# Altium footprint library Footprint.PcbLib: 154 footprints (part 3 of 10)
Each footprint in its own frame and in the unit in brackets; x right, y up, seen from the top. Pads: shape width x height; smd on the part's side, far side on the other; paste and mask are expansions set on the pad; w line width, h text height; cw(c..) or ccw(c..) is an arc to the next point about the centre after c.
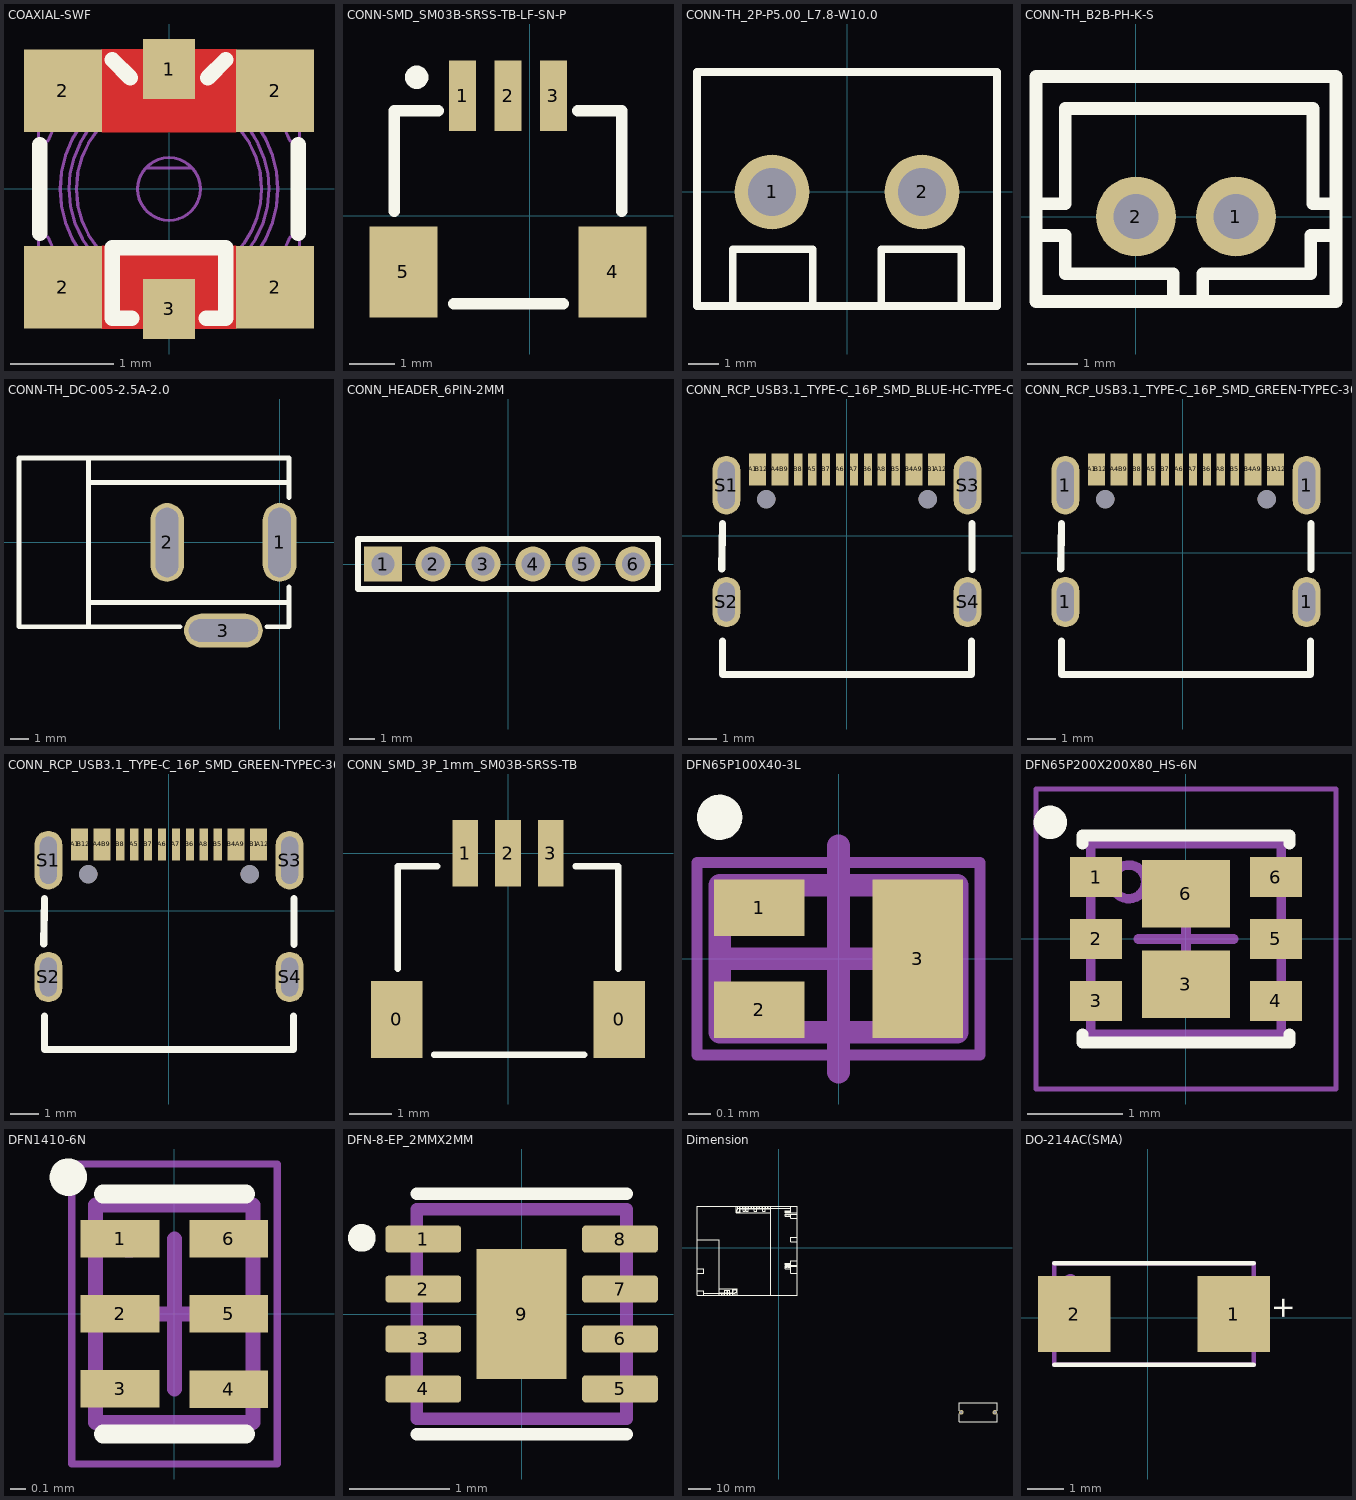
[diagram p2: the footprints below, top view; thin cyan lines are the x and y axes]

## COAXIAL-SWF [mm]
pads (6):
  rect 0.5x0.58 smd: 1(0,1.16) 3(0,-1.16)
  rect 0.75x0.8 smd: 2(-1.025,-0.95) 2(-1.025,0.95) 2(1.025,-0.95) 2(1.025,0.95)
Top Layer:
  pour cut-out: 0.65,-0.55 -0.65,-0.55 -0.65,-1.35 0.65,-1.35
  pour cut-out: -0.65,0.55 0.65,0.55 0.65,1.35 -0.65,1.35
Top Overlay:
  lines w0.15: -1.25,-0.43 -1.25,0.43 ; -0.55,1.25 -0.375,1.075 ; -0.36,-1.25 -0.55,-1.25 -0.55,-0.57 0.55,-0.57 0.55,-1.25 0.36,-1.25 ; 0.375,1.075 0.55,1.25 ; 1.25,-0.43 1.25,0.43
Mechanical 7:
  drawing of 206 lines, arcs and shapes, not listed
  text ".Designator" at -0.785,-0.7 h0.38
3D body: height 0.6, standoff 0.55, extent -1.262,-1.248 1.262,1.251
3D body: height 0.15, standoff 0, extent -0.227,0.899 0.227,1.299
3D body: height 0.15, standoff 0, extent -0.227,-1.301 0.227,-0.758
3D body: height 1.55, standoff 1.25, extent -1.05,-1.05 1.05,1.05
3D body: height 1.25, standoff 0.95, extent -1.05,-1.049 1.05,1.05
3D body: height 0.9, standoff 0.6, extent -1.05,-1.049 1.05,1.05
3D body: height 0.55, standoff 0.1, extent -1.262,-1.252 1.262,1.253
3D body: height 0.6, standoff 0, extent -1.262,0.655 -0.757,1.248
3D body: height 0.6, standoff 0, extent -1.262,-1.25 -0.757,-0.649
3D body: height 0.6, standoff 0, extent 0.757,-1.246 1.262,-0.653
3D body: height 0.6, standoff 0, extent 0.757,0.655 1.262,1.249
3D body: height 0.95, standoff 0.75, extent -1,-0.999 1,1.001
3D body: height 0.75, standoff 0.6, extent -1.05,-1.049 1.05,1.05
3D body: height 1.4, standoff 0.6, extent -0.9,-0.9 0.9,0.901

## CONN-SMD_SM03B-SRSS-TB-LF-SN-P [mm]
pads (5):
  rect 0.6x1.55 smd paste+0 mask+0.051: 1(-1.481,2.64) 2(-0.48,2.64) 3(0.52,2.64)
  rect 1.5x2 smd paste+0 mask+0.051: 4(1.82,-1.235) 5(-2.781,-1.235)
Top Overlay:
  circle w0.254: c-2.489,3.048 r0.13
  lines w0.254: -2.981,0.102 -2.981,2.315 ; -2.85,2.315 -2.981,2.315 ; -2.012,2.315 -2.981,2.315 ; -1.676,-1.93 0.737,-1.93 ; 1.051,2.315 2.019,2.315 2.019,0.102
3D body "SM03B-SRSS-TB(LF)(SN)--3DModel-STEP-56544.STEP": height 2.96, standoff 0, extent -2.906,-2.032 2.094,2.918

## CONN-TH_2P-P5.00_L7.8-W10.0 [mm]
pads (2):
  round 2.5 hole 1.6 paste-2539.97 mask+0.051: 1(-2.5,0) 2(2.5,0)
Top Overlay:
  lines w0.254: -3.81,-3.683 -3.81,-1.905 -1.143,-1.905 -1.143,-3.683 ; 1.143,-3.683 1.143,-1.905 3.81,-1.905 3.81,-3.683 ; -5,-3.8 5,-3.8 5,4 -5,4 -5,-3.8
3D body "User Library-WJ127-5_0-2P.step": height 10.3, standoff -2.8, extent -5,-3.96 5,4.14

## CONN-TH_B2B-PH-K-S [mm]
pads (2):
  round 1.6 hole 0.9 paste-2539.97 mask+0.051: 1(2,0) 2(0,0)
Top Overlay:
  lines w0.254: -1.921,-0.381 -1.413,-0.381 -1.413,-1.143 0.746,-1.143 0.746,-1.651 ; -1.921,0.254 -1.413,0.254 -1.413,2.159 3.54,2.159 3.54,0.254 3.921,0.254 ; 1.333,-1.651 1.333,-1.143 3.492,-1.143 3.492,-0.381 4,-0.381 ; -2,-1.7 -2,2.8 4,2.8 4,-1.7 -2,-1.7
3D body "B2B-PH-K-S(LF)(SN)--3DModel-STEP-56544.STEP": height 6, standoff -3.4, extent -1.959,-1.564 3.941,2.936

## CONN-TH_DC-005-2.5A-2.0 [mm]
pads (3):
  oval 1.8x4.2 hole 1.2 slot 3.7 at 90 deg paste-2539.97 mask+0.051: 1(0,0) 2(-5.999,0)
  oval 4.2x1.8 hole 1.2 slot 3.7 at 0 deg paste-2539.97 mask+0.051: 3(-3,-4.7)
Top Overlay:
  lines w0.254: -10.199,-4.5 -10.199,4.5 ; -10.119,-3.2 0.501,-3.2 ; -10.119,3.2 0.501,3.2 ; -5.313,-4.5 -13.9,-4.5 -13.9,4.5 0.501,4.5 0.501,2.388 ; -0.687,-4.5 0.501,-4.5 0.501,-2.362
3D body "dc-005-5a-2_0.stp": height 11, standoff -3.6, extent -13.848,-4.878 0.152,4.522

## CONN_HEADER_6PIN-2MM [mm]
pads (6):
  rect 1.524x1.4 hole 0.9 paste-2539.97 mask+0.051: 1(-5,0)
  round 1.4 hole 0.9 paste-2539.97 mask+0.051: 2(-3,0) 3(-1,0) 4(1,0) 5(3,0) 6(5,0)
Top Overlay:
  lines w0.254: -6,-1 6,-1 6,1 -6,1 -6,-1
3D body "PinHeader_1x06_P2.00mm_Vertical.step": height 6.1, standoff -2.7, extent -5.924,-1.009 6.076,0.991

## CONN_RCP_USB3.1_TYPE-C_16P_SMD_BLUE-HC-TYPE-C-16P-01A-L [mm]
pads (22):
  rect 0.3x1.15 smd mask+0.04: A1(-3.35,2.373) A4(-2.55,2.373) A5(-1.25,2.373) A6(-0.25,2.373) A7(0.25,2.373) A8(1.25,2.373) A9(2.55,2.373) A12(3.35,2.373) B1(3.05,2.373) B4(2.25,2.373) B5(1.75,2.373) B6(0.75,2.373) B7(-0.75,2.373) B8(-1.75,2.373) B9(-2.25,2.373) B12(-3.05,2.373)
  oval 1x2.1 hole 0.6 slot 1.7 at 90 deg: S1(-4.32,1.807) S3(4.32,1.807)
  oval 1x1.8 hole 0.6 slot 1.4 at 90 deg: S2(-4.32,-2.373) S4(4.32,-2.373)
  round 0.65 hole 0.65 unplated mask+0.04: ""(-2.89,1.308) ""(2.89,1.308)
Top Overlay:
  lines w0.254: -4.484,-1.188 -4.459,0.438 ; -4.459,-3.778 -4.459,-4.972 4.457,-4.972 4.457,-3.778 ; 4.482,-1.213 4.482,0.438
Mechanical 15:
  circle w0.25: c-2.89,1.308 r0.125
  circle w0.25: c2.89,1.308 r0.125
3D body "TYPE-C-31-M-12--3DModel-STEP-56544.STEP": height 3.31, standoff -0.99, extent -4.484,-5.007 4.456,2.898

## CONN_RCP_USB3.1_TYPE-C_16P_SMD_GREEN-TYPEC-304A-ACP16G [mm]
pads (22):
  oval 1x1.8 hole 0.6 slot 1.4 at 90 deg: 1(-4.205,-1.769) 1(4.435,-1.769)
  oval 1x2.1 hole 0.6 slot 1.7 at 90 deg: 1(-4.205,2.411) 1(4.435,2.411)
  rect 0.3x1.15 smd mask+0.04: A1(-3.235,2.976) A4(-2.435,2.976) A5(-1.135,2.976) A6(-0.135,2.976) A7(0.365,2.976) A8(1.365,2.976) A9(2.665,2.976) A12(3.465,2.976) B1(3.165,2.976) B4(2.365,2.976) B5(1.865,2.976) B6(0.865,2.976) B7(-0.635,2.976) B8(-1.635,2.976) B9(-2.135,2.976) B12(-2.935,2.976)
  round 0.65 hole 0.65 unplated mask+0.04: ""(-2.775,1.911) ""(3.005,1.911)
Top Overlay:
  lines w0.254: -4.369,-0.584 -4.343,1.041 ; -4.343,-3.175 -4.343,-4.369 4.572,-4.369 4.572,-3.175 ; 4.597,-0.61 4.597,1.041
Mechanical 15:
  circle w0.25: c-2.775,1.911 r0.125
  circle w0.25: c3.005,1.911 r0.125
3D body "USB Type C Port (SMD Type).STEP": height 3.26, standoff -0.94, extent -4.343,-4.379 4.597,3.521

## CONN_RCP_USB3.1_TYPE-C_16P_SMD_GREEN-TYPEC-304A-ACP16G - duplicate [mm]
pads (22):
  rect 0.3x1.15 smd mask+0.04: A1(-3.35,2.373) A4(-2.55,2.373) A5(-1.25,2.373) A6(-0.25,2.373) A7(0.25,2.373) A8(1.25,2.373) A9(2.55,2.373) A12(3.35,2.373) B1(3.05,2.373) B4(2.25,2.373) B5(1.75,2.373) B6(0.75,2.373) B7(-0.75,2.373) B8(-1.75,2.373) B9(-2.25,2.373) B12(-3.05,2.373)
  oval 1x2.1 hole 0.6 slot 1.7 at 90 deg: S1(-4.32,1.807) S3(4.32,1.807)
  oval 1x1.8 hole 0.6 slot 1.4 at 90 deg: S2(-4.32,-2.373) S4(4.32,-2.373)
  round 0.65 hole 0.65 unplated mask+0.04: ""(-2.89,1.308) ""(2.89,1.308)
Top Overlay:
  lines w0.254: -4.484,-1.188 -4.459,0.438 ; -4.459,-3.778 -4.459,-4.972 4.457,-4.972 4.457,-3.778 ; 4.482,-1.213 4.482,0.438
Mechanical 15:
  circle w0.25: c-2.89,1.308 r0.125
  circle w0.25: c2.89,1.308 r0.125

## CONN_SMD_3P_1mm_SM03B-SRSS-TB [mm]
pads (5):
  rect 1.2x1.8 smd: 0(-2.6,-3.875) 0(2.6,-3.875)
  rect 0.6x1.55 smd: 1(-1,0) 2(0,0) 3(1,0)
Top Overlay:
  lines w0.15: -2.575,-2.692 -2.575,-0.3 -1.651,-0.3 ; -1.727,-4.699 1.778,-4.699 ; 1.575,-0.3 2.575,-0.3 2.575,-2.692
3D body "SM03B-SRSS-TB.STEP": height 2.95, standoff -0.01, extent -2.5,-4.606 2.5,0.344

## DFN65P100X40-3L [mm]
pads (3):
  rect 0.4x0.25 smd: 1(-0.35,0.225) 2(-0.35,-0.225)
  rect 0.4x0.7 smd: 3(0.35,0)
Top Overlay:
  circle w0.1: c-0.525,0.625 r0.05
Mechanical 7:
  lines w0.1: -0.525,-0.325 0.525,-0.325 0.525,0.325 -0.525,0.325 -0.525,-0.325
  text ".Designator" at -0.425,-0.175 h0.38
Mechanical 15:
  lines w0.05: -0.625,-0.425 0.625,-0.425 0.625,0.425 -0.625,0.425 -0.625,-0.425
  lines w0.1: -0.5,0 0.5,0 ; 0,-0.5 0,0.5
3D body "DFN65P100X40-3L.step": height 0.4, standoff 0, extent -0.525,-0.325 0.525,0.325

## DFN65P200X200X80_HS-6N [mm]
pads (8):
  rect 0.55x0.42 smd mask+0.055: 1(-0.945,0.65) 2(-0.945,0) 3(-0.945,-0.65) 4(0.945,-0.65) 5(0.945,0) 6(0.945,0.65)
  rect 0.92x0.71 smd mask+0.055: 3(0,-0.475) 6(0,0.475)
Top Overlay:
  circle w0.25: c-1.425,1.225 r0.05
  lines w0.125: -1.085,-1 -1.085,-1.085 1.085,-1.085 1.085,-1 ; -1.085,1 -1.085,1.085 1.085,1.085 1.085,1
Mechanical 7:
  circle w0.1: c-0.6,0.6 r0.177
  lines w0.1: -1,-1 -1,1 1,1 1,-1 -1,-1
  text ".Designator" at -0.6,-0.2 h0.38
Mechanical 15:
  lines w0.05: -1.575,-1.575 -1.575,1.575 1.575,1.575 1.575,-1.575 -1.575,-1.575
  lines w0.1: -0.5,0 0.5,0 ; 0,-0.5 0,0.5
3D body "DFN65P200X200X80_HS-6N.step": height 0.8, standoff 0, extent -1.025,-1.025 1.025,1.025

## DFN1410-6N [mm]
pads (6):
  rect 0.525x0.25 smd mask+0.05: 1(-0.363,0.5) 2(-0.363,0) 3(-0.363,-0.5) 4(0.363,-0.5) 5(0.363,0) 6(0.363,0.5)
Top Overlay:
  circle w0.15: c-0.707,0.912 r0.05
  lines w0.125: -0.475,-0.8 0.475,-0.8 ; -0.475,0.8 0.475,0.8
Mechanical 7:
  circle w0.15: c-0.3,0.5 r0.05
  lines w0.1: -0.525,-0.725 0.525,-0.725 0.525,0.725 -0.525,0.725 -0.525,-0.725
  text ".Designator" at 0,0.55 h0.38
Mechanical 15:
  lines w0.05: -0.685,-1 0.685,-1 0.685,1 -0.685,1 -0.685,-1
  lines w0.1: -0.5,0 0.5,0 ; 0,-0.5 0,0.5
3D body "PSON50P100X40-6N.step": height 0.4, standoff 0, extent -0.526,-0.725 0.526,0.725

## DFN-8-EP_2MMX2MM [mm]
pads (9):
  rrect25% 0.76x0.27 smd mask+0.04: 1(-0.985,0.75) 2(-0.985,0.25) 3(-0.985,-0.25) 4(-0.985,-0.75) 5(0.985,-0.75) 6(0.985,-0.25) 7(0.985,0.25) 8(0.985,0.75)
  rect 0.9x1.3 smd paste-2 mask+0.04: 9(0,0)
Top Overlay:
  circle w0.2: c-1.6,0.762 r0.039
  lines w0.127: -1.05,-1.205 1.05,-1.205 ; -1.05,1.205 1.05,1.205
Mechanical 13:
  lines w0.127: -1.05,-1.05 1.05,-1.05 1.05,1.05 -1.05,1.05 -1.05,-1.05
3D body "step_temp.STEP": height 0.8, standoff 0, extent -1,-1 1,1

## Dimension [mm]
pads (2):
  round 2 hole 1.2 paste-2539.97 mask+0.05: 1(81.791,-73.743) 2(96.791,-73.743)
Top Overlay:
  drawing of 264 lines, arcs and shapes, not listed

## DO-214AC(SMA) [mm]
pads (2):
  rect 2x2.1 smd: 1(2.378,0.102) 2(-2.022,0.102)
Top Overlay:
  lines w0.127: -2.565,-1.295 2.921,-1.295 ; -2.565,1.499 2.921,1.499
  text "+" at 4.191,-0.076 h1
Top Component Outline:
  circle w0.2: c-2.122,1.002 r0.1
  lines w0.127: -2.565,-1.295 2.921,-1.295 2.921,1.499 -2.565,1.499 -2.565,-1.295
3D body "User Library-DO-214AC(SMA).step": height 2.29, standoff 0.01, extent -2.565,-1.295 2.921,1.499